# Altium schematic symbol library 5Cnts-S.SchLib: 1 symbol
Pins are listed as number, name and electrical type; pins without a type are passive.

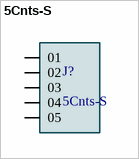
[diagram p0: symbol 5Cnts-S]

## 5Cnts-S
designator J?
MP: MTSW-105-10-G-S-640; Price: None; Availability: Unavailable; Value: *; Package: None
footprint 5Cnts-S
pins: 01, 02, 03, 04, 05